# Altium schematic symbol library RT0603BRD071K3L.SchLib: 1 symbol
Pins are listed as number, name and electrical type; pins without a type are passive.

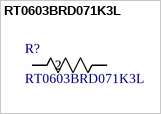
[diagram p0: symbol RT0603BRD071K3L]

## RT0603BRD071K3L
designator R?
No Description Available; Manufacturer_Name: Yageo; Copyright: Copyright (C) 2026 Ultra Librarian. All rights reserved.; Manufacturer_Part_Number: RT0603BRD071K3L
footprint RC0603N_YAG
pins: 1, 2